# Altium schematic symbol library TD-104-G-AA.SchLib: 1 symbol
Pins are listed as number, name and electrical type; pins without a type are passive.

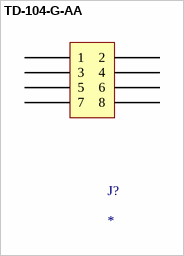
[diagram p0: symbol TD-104-G-AA]

## TD-104-G-AA
designator J?
8-Pin (2x4) Double-Row Vertical Male Header, 2.54mm Pitch, THT, Gold-Plated
footprint PCBComponent_1
pins: 1, 2, 3, 4, 5, 6, 7, 8